# Altium schematic symbol library VRE-102M.SchLib: 1 symbol
Pins are listed as number, name and electrical type; pins without a type are passive.

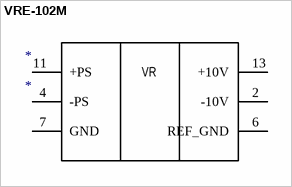
[diagram p0: symbol VRE-102M]

## VRE-102M
designator *
pins: 2 -10V, 4 -PS, 6 REF_GND, 7 GND, 11 +PS, 13 +10V
text: VR